# Altium footprint library LDCFullN.PcbLib: 36 footprints (part 1 of 3)
Each footprint in its own frame and in the unit in brackets; x right, y up, seen from the top. Pads: shape width x height; smd on the part's side, far side on the other; paste and mask are expansions set on the pad; w line width, h text height; cw(c..) or ccw(c..) is an arc to the next point about the centre after c.
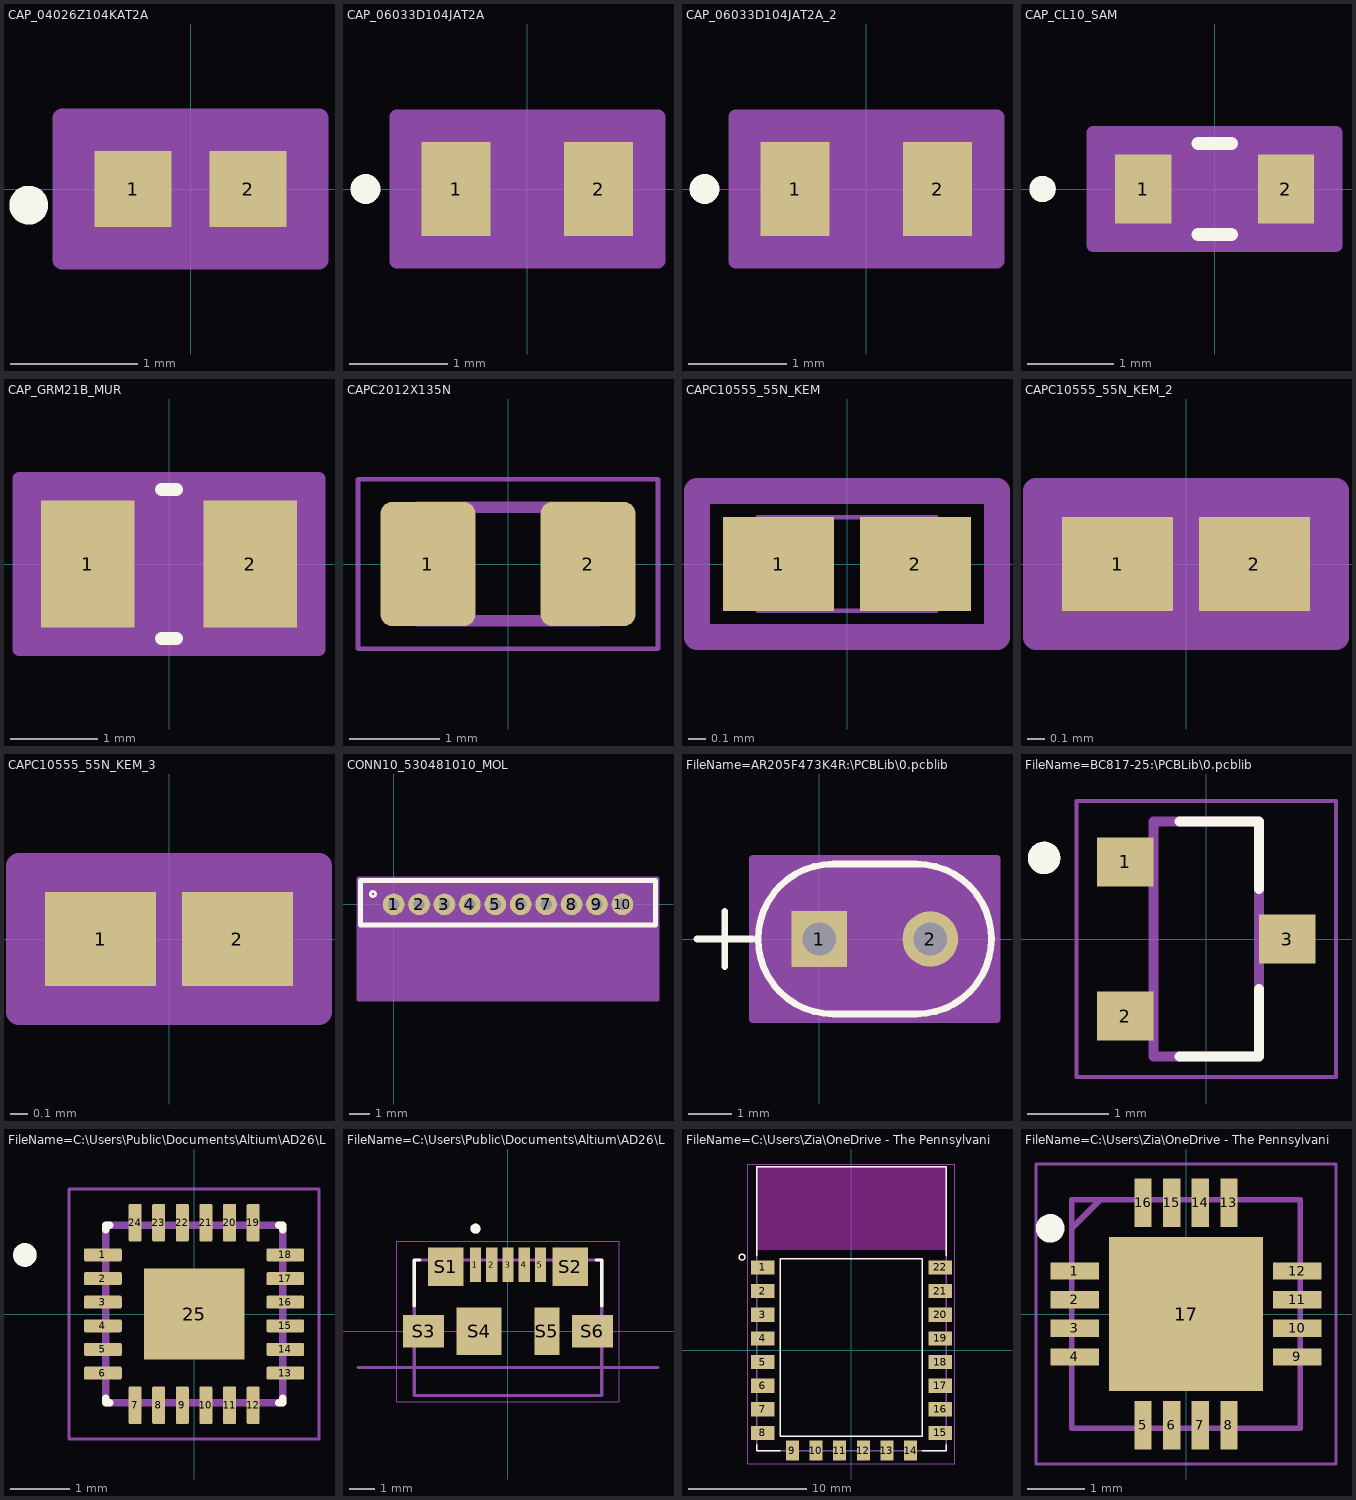
[diagram p0: the footprints below, top view; thin cyan lines are the x and y axes]

## CAP_04026Z104KAT2A [mm]
pads (2):
  rect 0.603x0.6 smd paste+0 mask+0: 1(-0.452,0) 2(0.452,0)
Top Overlay:
  circle w0.152: c-1.27,-0.127 r0.076
Mechanical 13:
  circle w0.025: c-0.325,0 r0.076
  lines w0.025: -0.55,-0.3 -0.55,0.3 ; -0.55,-0.3 0.55,-0.3 ; -0.55,-0.3 -0.15,-0.3 -0.15,0.3 -0.55,0.3 ; -0.55,-0.3 -0.55,0.3 ; -0.55,0.3 0.55,0.3 ; 0.55,-0.3 0.55,0.3 ; 0.55,-0.3 0.55,0.3 ; 0.55,-0.3 0.15,-0.3 0.15,0.3 0.55,0.3
Mechanical 15:
  region: 1.007,-0.554 -1.007,-0.554 -1.007,0.554 1.007,0.554
  lines w0.152: -1.007,-0.554 1.007,-0.554 1.007,0.554 -1.007,0.554 -1.007,-0.554
3D body "CAP_04026Z104KAT2A.step": height 0.56, standoff 0, extent -0.55,-0.3 0.55,0.3

## CAP_06033D104JAT2A [mm]
pads (2):
  rect 0.703x0.96 smd paste+0 mask+0: 1(-0.727,0) 2(0.727,0)
Top Overlay:
  circle w0.152: c-1.651,0 r0.076
Mechanical 13:
  circle w0.025: c-0.6,0 r0.076
  lines w0.025: -0.875,-0.48 -0.875,0.48 ; -0.875,-0.48 -0.375,-0.48 -0.375,0.48 -0.875,0.48 ; -0.875,-0.48 0.875,-0.48 ; -0.875,-0.48 -0.875,0.48 ; -0.875,0.48 0.875,0.48 ; 0.875,-0.48 0.375,-0.48 0.375,0.48 0.875,0.48 ; 0.875,-0.48 0.875,0.48 ; 0.875,-0.48 0.875,0.48
Mechanical 15:
  region: 1.332,-0.734 -1.332,-0.734 -1.332,0.734 1.332,0.734
  lines w0.152: -1.332,-0.734 -1.332,0.734 1.332,0.734 1.332,-0.734 -1.332,-0.734
3D body "CAP_06033D104JAT2A.step": height 0.9, standoff 0, extent -0.875,-0.48 0.875,0.48

## CAP_06033D104JAT2A_2 [mm]
pads (2):
  rect 0.703x0.96 smd paste+0 mask+0: 1(-0.727,0) 2(0.727,0)
Top Overlay:
  circle w0.152: c-1.651,0 r0.076
Mechanical 13:
  circle w0.025: c-0.6,0 r0.076
  lines w0.025: -0.875,-0.48 -0.875,0.48 ; -0.875,-0.48 0.875,-0.48 ; -0.875,-0.48 -0.375,-0.48 -0.375,0.48 -0.875,0.48 ; -0.875,-0.48 -0.875,0.48 ; -0.875,0.48 0.875,0.48 ; 0.875,-0.48 0.875,0.48 ; 0.875,-0.48 0.875,0.48 ; 0.875,-0.48 0.375,-0.48 0.375,0.48 0.875,0.48
Mechanical 15:
  region: 1.332,-0.734 -1.332,-0.734 -1.332,0.734 1.332,0.734
  lines w0.152: -1.332,-0.734 1.332,-0.734 1.332,0.734 -1.332,0.734 -1.332,-0.734
3D body "CAP_06033D104JAT2A.step": height 0.9, standoff 0, extent -0.875,-0.48 0.875,0.48

## CAP_CL10_SAM [mm]
pads (2):
  rect 0.65x0.8 smd paste+0 mask+0: 1(-0.825,0) 2(0.825,0)
Top Overlay:
  circle w0.152: c-1.988,0 r0.076
  lines w0.152: -0.192,-0.527 0.192,-0.527 ; -0.192,0.527 0.192,0.527
Mechanical 13:
  circle w0.025: c-0.698,0 r0.076
  lines w0.025: -0.8,-0.4 -0.8,0.4 ; -0.8,-0.4 -0.5,-0.4 -0.5,0.4 -0.8,0.4 ; -0.8,-0.4 0.8,-0.4 ; -0.8,-0.4 -0.8,0.4 ; -0.8,0.4 0.8,0.4 ; 0.8,-0.4 0.5,-0.4 0.5,0.4 0.8,0.4 ; 0.8,-0.4 0.8,0.4 ; 0.8,-0.4 0.8,0.4
Mechanical 15:
  region: 1.404,-0.654 -1.404,-0.654 -1.404,0.654 1.404,0.654
  lines w0.152: -1.404,-0.654 -1.404,0.654 1.404,0.654 1.404,-0.654 -1.404,-0.654
3D body "CAP_CL10_SAM.step": height 0.9, standoff 0, extent -0.8,-0.4 0.8,0.4

## CAP_GRM21B_MUR [mil]
pads (2):
  rect 42x57 smd paste+0 mask+0: 1(-36.5,0) 2(36.5,0)
Top Overlay:
  lines w6: -3.39,-33.5 3.39,-33.5 ; -3.39,33.5 3.39,33.5
Mechanical 13:
  lines w1: -43.5,-28.5 -43.5,28.5 ; -43.5,-28.5 43.5,-28.5 ; -43.5,-28.5 -15.5,-28.5 -15.5,28.5 -43.5,28.5 ; -43.5,-28.5 -43.5,28.5 ; -43.5,28.5 43.5,28.5 ; 43.5,-28.5 43.5,28.5 ; 43.5,-28.5 43.5,28.5 ; 43.5,-28.5 15.5,-28.5 15.5,28.5 43.5,28.5
Mechanical 15:
  region: 67.5,-38.5 -67.5,-38.5 -67.5,38.5 67.5,38.5
  lines w6: -67.5,-38.5 67.5,-38.5 67.5,38.5 -67.5,38.5 -67.5,-38.5
3D body "CAP_GRM21B_MUR.step": height 57.01, standoff 0, extent -43.5,-28.5 43.5,28.5

## CAPC2012X135N [mm]
pads (2):
  rrect25% 1.05x1.38 smd: 1(-0.888,0) 2(0.888,0)
Mechanical 13:
  lines w0.127: -1,-0.63 1,-0.63 1,0.63 -1,0.63 -1,-0.63
Mechanical 15:
  lines w0.05: -1.663,-0.94 1.663,-0.94 1.663,0.94 -1.663,0.94 -1.663,-0.94
3D body "step_temp.STEP": height 1.35, standoff 0, extent -1,-0.625 1,0.625

## CAPC10555_55N_KEM [mm]
pads (2):
  rect 0.653x0.55 smd paste+0 mask+0: 1(-0.402,0) 2(0.402,0)
Mechanical 13:
  lines w0.025: -0.525,-0.275 -0.525,0.275 ; -0.525,-0.275 0.525,-0.275 ; -0.525,-0.275 -0.125,-0.275 -0.125,0.275 -0.525,0.275 ; -0.525,-0.275 -0.525,0.275 ; -0.525,0.275 0.525,0.275 ; 0.525,-0.275 0.525,0.275 ; 0.525,-0.275 0.525,0.275 ; 0.525,-0.275 0.125,-0.275 0.125,0.275 0.525,0.275
Mechanical 15:
  lines w0.152: -0.881,-0.427 0.881,-0.427 0.881,0.427 -0.881,0.427 -0.881,-0.427
3D body "CAPC10555_55N_KEM.step": height 0.55, standoff 0, extent -0.525,-0.275 0.525,0.275

## CAPC10555_55N_KEM_2 [mm]
pads (2):
  rect 0.653x0.55 smd paste+0 mask+0: 1(-0.402,0) 2(0.402,0)
Mechanical 13:
  lines w0.025: -0.525,-0.275 -0.525,0.275 ; -0.525,-0.275 0.525,-0.275 ; -0.525,-0.275 -0.125,-0.275 -0.125,0.275 -0.525,0.275 ; -0.525,-0.275 -0.525,0.275 ; -0.525,0.275 0.525,0.275 ; 0.525,-0.275 0.525,0.275 ; 0.525,-0.275 0.525,0.275 ; 0.525,-0.275 0.125,-0.275 0.125,0.275 0.525,0.275
Mechanical 15:
  region: 0.881,-0.427 -0.881,-0.427 -0.881,0.427 0.881,0.427
  lines w0.152: -0.881,-0.427 0.881,-0.427 0.881,0.427 -0.881,0.427 -0.881,-0.427
3D body "CAPC10555_55N_KEM.step": height 0.55, standoff 0, extent -0.525,-0.275 0.525,0.275

## CAPC10555_55N_KEM_3 [mm]
pads (2):
  rect 0.653x0.55 smd paste+0 mask+0: 1(-0.402,0) 2(0.402,0)
Mechanical 13:
  lines w0.025: -0.525,-0.275 -0.525,0.275 ; -0.525,-0.275 0.525,-0.275 ; -0.525,-0.275 -0.125,-0.275 -0.125,0.275 -0.525,0.275 ; -0.525,-0.275 -0.525,0.275 ; -0.525,0.275 0.525,0.275 ; 0.525,-0.275 0.525,0.275 ; 0.525,-0.275 0.525,0.275 ; 0.525,-0.275 0.125,-0.275 0.125,0.275 0.525,0.275
Mechanical 15:
  region: 0.881,-0.427 -0.881,-0.427 -0.881,0.427 0.881,0.427
  lines w0.152: -0.881,-0.427 0.881,-0.427 0.881,0.427 -0.881,0.427 -0.881,-0.427
3D body "CAPC10555_55N_KEM.step": height 0.55, standoff 0, extent -0.525,-0.275 0.525,0.275

## CONN10_530481010_MOL [mil]
pads (10):
  round 42 hole 22 paste-99999 mask+0: 1(0,0) 2(49.21,0) 3(98.43,0) 4(147.64,0) 5(196.85,0) 6(246.06,0) 7(295.28,0) 8(344.49,0) 9(393.7,0) 10(442.91,0)
Top Overlay:
  circle w5: c-40,20 r5
  lines w10: -64.04,-40 -64.04,46.34 506.96,46.34 506.96,-40 -64.04,-40
Mechanical 13:
  circle w20: c0,0 r15
  lines w1: -59.04,-175.66 -59.04,41.34 501.96,41.34 501.96,-175.66 -59.04,-175.66
Mechanical 15:
  region: 511.96,51.34 -69.04,51.34 -69.04,-185.66 511.96,-185.66
  lines w6: -69.04,-185.66 511.96,-185.66 511.96,51.34 -69.04,51.34 -69.04,-185.66

## FileName=AR205F473K4R:\PCBLib\0.pcblib [mil]
pads (2):
  rect 50x50 hole 30 paste-99999 mask+0: 1(0,0)
  round 50 hole 30 paste-99999 mask+0: 2(100,0)
Top Overlay:
  lines w6: -110,0 -60,0 ; -85,-25 -85,25 ; 12.5,-67.5 cw(c12.5,0) 12.5,67.5 87.5,67.5 cw(c87.5,0) 155,0 cw(c87.5,0) 87.5,-67.5 12.5,-67.5
Mechanical 13:
  lines w1: -110,0 -60,0 ; -85,-25 -85,25 ; 12.5,-62.5 cw(c12.5,0) 12.5,62.5 87.5,62.5 cw(c87.5,0) 87.5,-62.5 12.5,-62.5
Mechanical 15:
  region: 160,-72.5 -60,-72.5 -60,72.5 160,72.5
  lines w6: -60,-72.5 -60,72.5 160,72.5 160,-72.5 -60,-72.5
3D body "CAP_AR20_AVX.step": height 200, standoff -157.99, extent -50,-62.52 150,62.52

## FileName=BC817-25:\PCBLib\0.pcblib [mm]
height 1.1
pads (3):
  rect 0.7x0.6 smd paste-0.05 mask+0.102: 1(-1,0.95) 2(-1,-0.95) 3(1,0)
Top Overlay:
  circle w0.2: c-2,1 r0.1
  lines w0.127: -0.33,-1.45 0.65,-1.45 0.65,-0.62 ; -0.33,1.45 0.65,1.45 0.65,0.62
Mechanical 13:
  circle w0.2: c-2,1 r0.1
  lines w0.127: -0.65,-1.45 0.65,-1.45 0.65,1.45 -0.65,1.45 -0.65,-1.45
Mechanical 15:
  lines w0.05: -1.6,-1.7 1.6,-1.7 1.6,1.7 -1.6,1.7 -1.6,-1.7

## FileName=C:\Users\Public\Documents\Altium\AD26\Library\AltiumLib\MPU-9250\QFN40P300X300X105-25N.PcbLib [mm]
height 1.05
pads (25):
  rrect25% 0.64x0.22 smd: 1(-1.545,1) 2(-1.545,0.6) 3(-1.545,0.2) 4(-1.545,-0.2) 5(-1.545,-0.6) 6(-1.545,-1) 13(1.545,-1) 14(1.545,-0.6) 15(1.545,-0.2) 16(1.545,0.2) 17(1.545,0.6) 18(1.545,1)
  rrect25% 0.22x0.64 smd: 7(-1,-1.545) 8(-0.6,-1.545) 9(-0.2,-1.545) 10(0.2,-1.545) 11(0.6,-1.545) 12(1,-1.545) 19(1,1.545) 20(0.6,1.545) 21(0.2,1.545) 22(-0.2,1.545) 23(-0.6,1.545) 24(-1,1.545)
  rect 1.7x1.54 smd paste-2: 25(0,0)
Top Overlay:
  circle w0.2: c-2.865,1 r0.1
  lines w0.127: -1.5,-1.43 -1.5,-1.5 -1.43,-1.5 ; -1.5,1.43 -1.5,1.5 -1.43,1.5 ; 1.43,-1.5 1.5,-1.5 1.5,-1.43 ; 1.43,1.5 1.5,1.5 1.5,1.43
Top Paste:
  region: 0.538,-0.487 -0.538,-0.487 -0.538,0.487 0.538,0.487
Mechanical 13:
  circle w0.2: c-2.865,1 r0.1
  lines w0.127: -1.5,-1.5 1.5,-1.5 1.5,1.5 -1.5,1.5 -1.5,-1.5
Mechanical 15:
  lines w0.05: -2.115,-2.115 2.115,-2.115 2.115,2.115 -2.115,2.115 -2.115,-2.115
3D body "step_temp.STEP": height 1.05, standoff 0, extent -1.5,-1.5 1.5,1.5

## FileName=C:\Users\Public\Documents\Altium\AD26\Library\AltiumLib\USBMicro-47346-0001\MOLEX_47346-0001.PcbLib [mm]
height 2.94
pads (11):
  rect 0.45x1.38 smd: 1(-1.3,2.66) 2(-0.65,2.66) 3(0,2.66) 4(0.65,2.66) 5(1.3,2.66)
  rect 1.425x1.55 smd: S1(-2.488,2.575) S2(2.487,2.575)
  rect 1.65x1.3 smd: S3(-3.375,0) S6(3.375,0)
  rect 1.8x1.9 smd: S4(-1.15,0)
  rect 1x1.9 smd: S5(1.55,0)
Top Overlay:
  circle w0.2: c-1.3,4.1 r0.1
  lines w0.127: -3.75,1 -3.75,2.85 -3.52,2.85 ; 3.52,2.85 3.75,2.85 3.75,1
Mechanical 13:
  circle w0.2: c-1.3,4.1 r0.1
  lines w0.127: -6,-1.45 6,-1.45 ; -3.75,-2.58 -3.75,2.85 3.75,2.85 3.75,-2.58 -3.75,-2.58
Mechanical 15:
  lines w0.05: -4.45,-2.83 4.45,-2.83 4.45,3.6 -4.45,3.6 -4.45,-2.83

## FileName=C:\Users\Zia\OneDrive - The Pennsylvania State University\Desktop\LDCLast\Altium\ESP8266-12E_ESP-12E (1)\XCVR_ESP8266-12E_ESP-12E.PcbLib [mm]
pads (22):
  rect 2x1.2 smd: 1(-7.5,7) 2(-7.5,5) 3(-7.5,3) 4(-7.5,1) 5(-7.5,-1) 6(-7.5,-3) 7(-7.5,-5) 8(-7.5,-7) 15(7.5,-7) 16(7.5,-5) 17(7.5,-3) 18(7.5,-1) 19(7.5,1) 20(7.5,3) 21(7.5,5) 22(7.5,7)
  rect 1.1x1.7 smd: 9(-5,-8.5) 10(-3,-8.5) 11(-1,-8.5) 12(1,-8.5) 13(3,-8.5) 14(5,-8.5)
Top Overlay:
  circle w0.127: c-9.25,7.875 r0.25
  lines w0.127: -8,-8 -8,-8.5 -6,-8.5 ; -8,8 -8,15.5 8,15.5 8,8 ; 6,-8.5 8,-8.5 8,-8 ; -6,-7.26 -6,7.74 6,7.74 6,-7.26 -6,-7.26
Keep-Out Layer:
  region: 8,8.51 -8.009,8.51 -8.009,15.5 8,15.5
  region: 8,8.51 -8.009,8.51 -8.009,15.5 8,15.5
Mechanical 13:
  lines w0.127: -8,-8.5 -8,15.5 8,15.5 8,-8.5 -8,-8.5
Mechanical 15:
  lines w0.05: -8.75,-9.625 -8.75,15.75 8.75,15.75 8.75,-9.625 -8.75,-9.625

## FileName=C:\Users\Zia\OneDrive - The Pennsylvania State University\Desktop\LDCLast\Altium\LDCAltium\QFN50P400X400X80-17N.PcbLib [mm]
pads (17):
  rect 0.85x0.3 smd: 1(-1.95,0.75) 2(-1.95,0.25) 3(-1.95,-0.25) 4(-1.95,-0.75) 9(1.95,-0.75) 10(1.95,-0.25) 11(1.95,0.25) 12(1.95,0.75)
  rect 0.3x0.85 smd: 5(-0.75,-1.95) 6(-0.25,-1.95) 7(0.25,-1.95) 8(0.75,-1.95) 13(0.75,1.95) 14(0.25,1.95) 15(-0.25,1.95) 16(-0.75,1.95)
  rect 2.7x2.7 smd: 17(0,0)
Top Overlay:
  circle w0.25: c-2.375,1.5 r0.125
Mechanical 15:
  lines w0.1: -2,1.5 -1.5,2 ; -2,-2 2,-2 2,2 -2,2 -2,-2
Mechanical 20:
  lines w0.05: -2.625,-2.625 2.625,-2.625 2.625,2.625 -2.625,2.625 -2.625,-2.625